# Altium schematic symbol library 10uF electrolyte capacitor.SchLib: 1 symbol
Pins are listed as number, name and electrical type; pins without a type are passive.

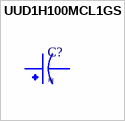
[diagram p0: symbol UUD1H100MCL1GS]

## UUD1H100MCL1GS
designator C?
Aluminum Electrolytic Capacitors - SMD, Low Impediance, 50volts 10uF | Nichicon UUD1H100MCL1GS; SnapEDA_Link: https://www.snapeda.com/parts/UUD1H100MCL1GS/Nichicon/view-part/?ref=snap; Package: RADIAL-2 Nichicon; Value: *; MF: Nichicon; MP: UUD1H100MCL1GS; Check_prices: https://www.snapeda.com/parts/UUD1H100MCL1GS/Nichicon/view-part/?ref=eda
footprint CAPAE660X610N
pins: N NEG, P POS